# EAGLE library part TQP3M9036 (library TQP3M9036)
RF Amplifier 400-2000MHz NF.45dB Gain 19dB @.9GHz LNA Source: Datasheet <https://www.qorvo.com/products/d/da005543>
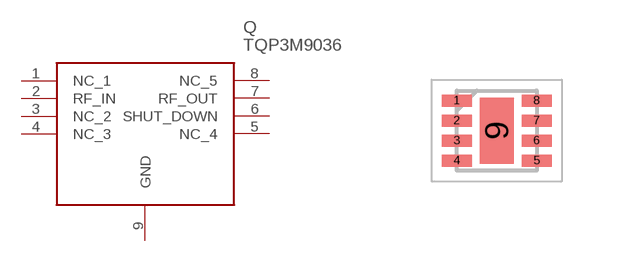
[diagram p0: symbol with the pads of SON50P200X200X95-9N; footprint SON50P200X200X95-9N]

Designator prefix Q

## TQP3M9036 (Description: RF Amplifier 400-2000MHz NF.45dB Gain 19dB @.9GHz LNA; Height: 0.95mm; Manufacturer_Name: Qorvo; Manufacturer_Part_Number: TQP3M9036; Mouser_Part_Number: 772-TQP3M9036; Mouser_Price-Stock: https://www.mouser.co.uk/ProductDetail/Qorvo/TQP3M9036?qs=73ok1p1Z9vuHVw3N%2FSkE8w%3D%3D)  [SON50P200X200X95-9N]
1  NC_1
2  RF_IN  in
3  NC_2
4  NC_3
5  NC_4
6  SHUT_DOWN  in
7  RF_OUT  out
8  NC_5
9  GND  pwr

## Footprint SON50P200X200X95-9N (pad centres in mm)
QFN DFN 8
smd 0.75 x 0.3: 1 -1,0.75; 2 -1,0.25; 3 -1,-0.25; 4 -1,-0.75; 5 1,-0.75; 6 1,-0.25; 7 1,0.25; 8 1,0.75
smd 0.85 x 1.65: 9 0,0